# Altium footprint library FootPrintLib_9.PcbLib: 287 footprints (part 10 of 18)
Each footprint in its own frame and in the unit in brackets; x right, y up, seen from the top. Pads: shape width x height; smd on the part's side, far side on the other; paste and mask are expansions set on the pad; w line width, h text height; cw(c..) or ccw(c..) is an arc to the next point about the centre after c.
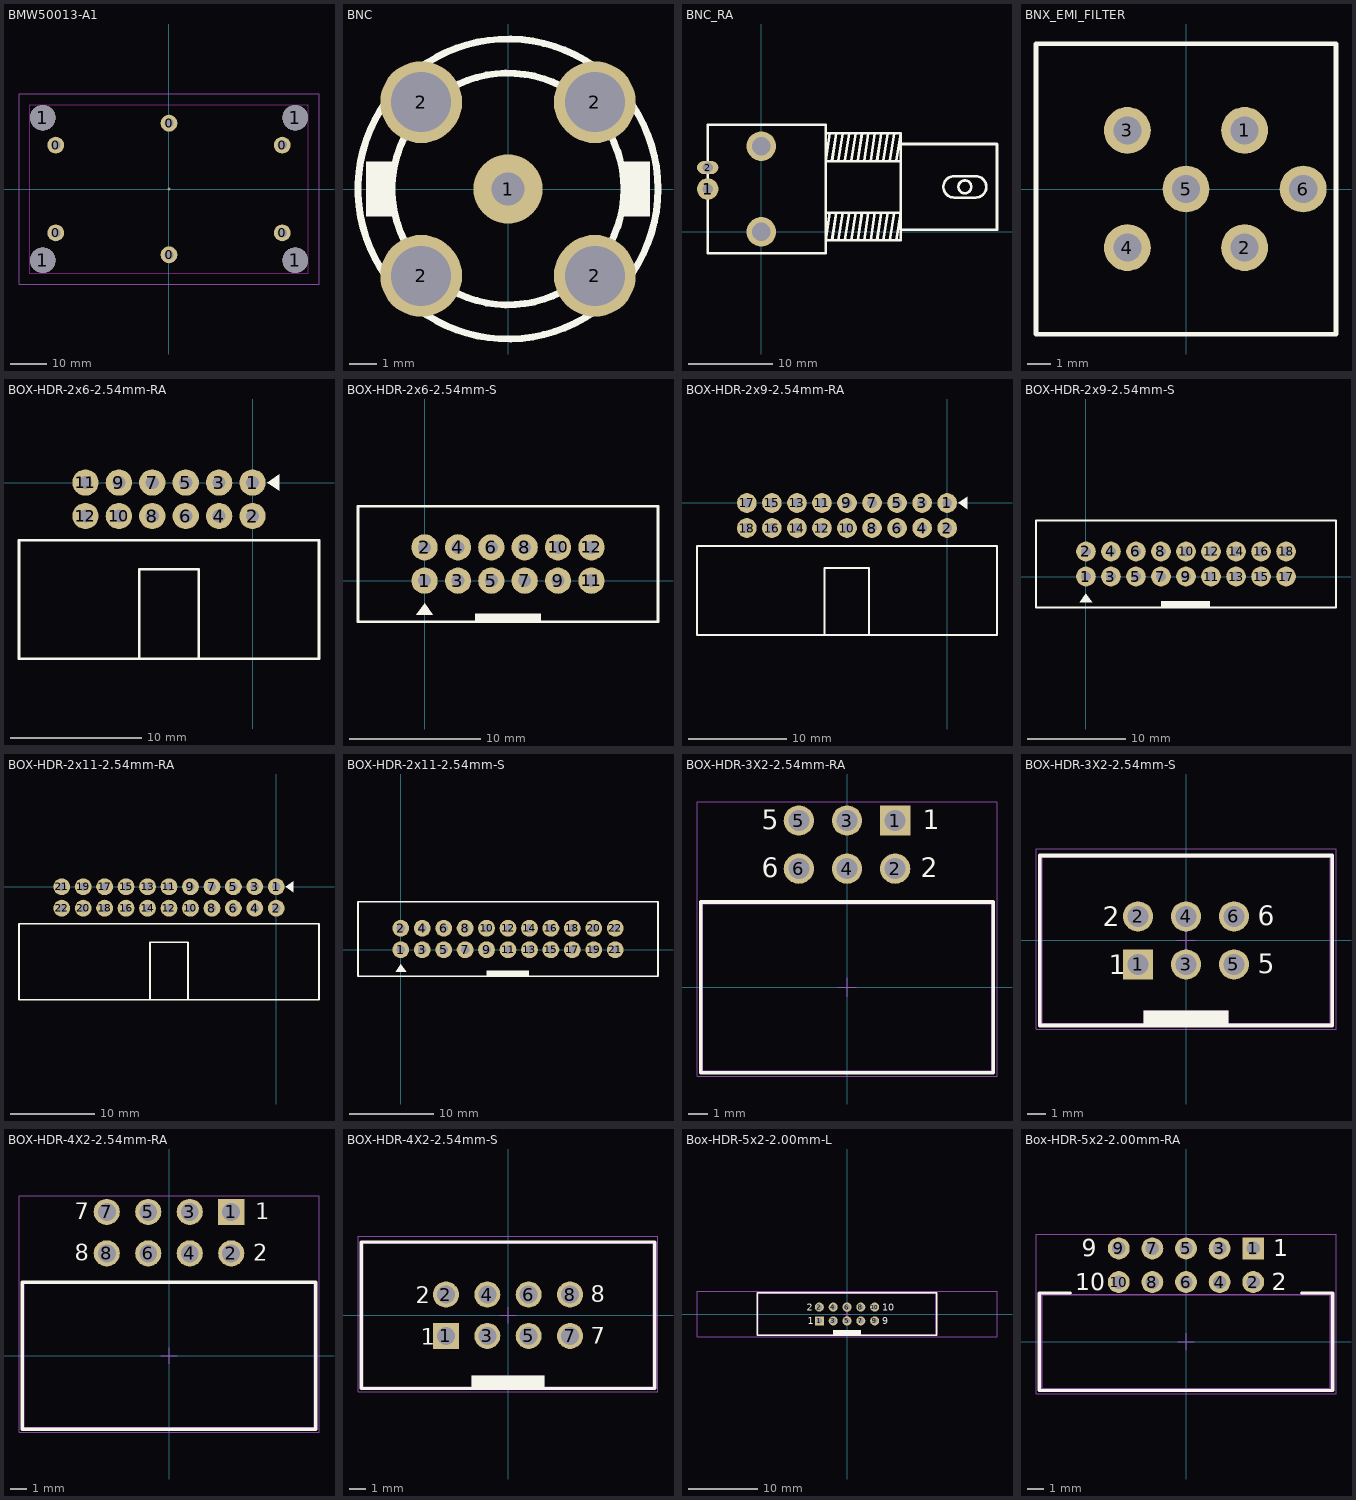
[diagram p9: the footprints below, top view; thin cyan lines are the x and y axes]

## BMW50013-A1 [mm]
pads (10):
  round 4.6 hole 2.5: 0(-30.95,-12) 0(-30.95,12) 0(0,-18) 0(0,18) 0(30.95,-12) 0(30.95,12)
  round 7 hole 7: 1(-34.5,-19.5) 1(-34.5,19.5) 1(34.5,-19.5) 1(34.5,19.5)
via 0,0 diameter 0.8 hole 0.5
Keep-Out Layer:
  lines w0.254: -38.1,-23 -38.1,23 38.1,23 38.1,-23 -38.1,-23
Mechanical 15:
  lines w0.254: -41,-26 41,-26 41,26 -41,26 -41,-26

## BNC [mm]
pads (5):
  round 2.54 hole 1.2: 1(0,0)
  round 3 hole 2.2: 2(-3.182,-3.182) 2(-3.182,3.182) 2(3.182,-3.182) 2(3.182,3.182)
Top Overlay:
  circle w0.254: c0,0 r4.25
  circle w0.254: c0,0 r5.5
  rectangle: -5.207,-1.016 -4.191,1.016
  region: 5.207,1.016 4.191,1.016 4.191,-1.016 5.207,-1.016

## BNC_RA [mm]
pads (4):
  round 2.54 hole 1.2: 1(-6.35,5.08)
  oval 2.54x1.524 hole 1.2: 2(-6.35,7.62)
  round 3.5 hole 2.2: ""(0,0) ""(0,10.16)
Top Overlay:
  circle w0.305: c24.13,5.334 r0.762
  lines w0.305: 7.62,2.286 16.51,2.286 16.002,-1.016 ; 7.62,11.684 16.51,11.684 ; 8.128,2.286 7.62,-1.016 16.51,-1.016 16.51,11.684 ; 8.128,11.684 7.62,8.382 16.51,8.382 ; 8.382,-1.016 8.89,2.286 ; 8.382,8.382 8.89,11.684 ; 9.144,-1.016 9.652,2.286 ; 9.144,8.382 9.652,11.684 ; 9.906,-1.016 10.414,2.286 ; 9.906,8.382 10.414,11.684 ; 10.668,-1.016 11.176,2.286 ; 10.668,8.382 11.176,11.684 ; 11.43,-1.016 11.938,2.286 ; 11.43,8.382 11.938,11.684 ; 12.192,-1.016 12.7,2.286 ; 12.192,8.382 12.7,11.684 ; 12.954,-1.016 13.462,2.286 ; 12.954,8.382 13.462,11.684 ; 13.716,-1.016 14.224,2.286 ; 13.716,8.382 14.224,11.684 ; 14.478,-1.016 14.986,2.286 ; 14.478,8.382 14.986,11.684 ; 15.24,-1.016 15.748,2.286 ; 15.24,8.382 15.748,11.684 ; 16.002,8.382 16.51,11.684 ; 16.51,0.254 27.94,0.254 27.94,10.414 16.51,10.414 ; -6.35,-2.54 -6.35,12.7 7.62,12.7 7.62,-2.54 -6.35,-2.54 ; 22.86,4.064 cw(c22.86,5.334) 22.86,6.604 25.4,6.604 cw(c25.4,5.334) 25.4,4.064 22.86,4.064

## BNX_EMI_FILTER [mm] "Murata Co."
pads (6):
  round 2 hole 1.2 mask+0.1: 1(2.5,2.5) 2(2.5,-2.5) 3(-2.5,2.5) 4(-2.5,-2.5) 5(0,0) 6(5,0)
Top Overlay:
  lines w0.2: -6.4,-6.2 -6.4,6.2 6.4,6.2 6.4,-6.2 -6.4,-6.2
3D body "User Library-Murata_BNX002.STEP": height 12.5, standoff -5, extent -6,-5.5 6,5.5

## BOX-HDR-2x6-2.54mm-RA [mm] "Male Box Header Connector 2X6 Pitch 2.54mm"
height 8.8
pads (12):
  round 2 hole 1: 1(0,0) 2(0,-2.54) 3(-2.54,0) 4(-2.54,-2.54) 5(-5.08,0) 6(-5.08,-2.54) 7(-7.62,0) 8(-7.62,-2.54) 9(-10.16,0) 10(-10.16,-2.54) 11(-12.7,0) 12(-12.7,-2.54)
Top Overlay:
  region: 1.133,0 2.025,0.637 2.025,-0.637
  lines w0.2: -8.6,-13.375 -8.6,-6.575 -4.1,-6.575 -4.1,-13.375 ; -17.75,-13.375 -17.75,-4.375 5.05,-4.375 5.05,-13.375 -17.75,-13.375
3D body "IDC2x6_254_RA.step": height 9, standoff -2, extent -17.75,-13.38 5.05,0.4

## BOX-HDR-2x6-2.54mm-S [mm] "Male Box Header Connector 2X6 Pitch 2.54mm"
height 9
pads (12):
  round 2 hole 1: 1(0,0) 2(0,2.54) 3(2.54,0) 4(2.54,2.54) 5(5.08,0) 6(5.08,2.54) 7(7.62,0) 8(7.62,2.54) 9(10.16,0) 10(10.16,2.54) 11(12.7,0) 12(12.7,2.54)
Top Overlay:
  rectangle: 3.85,-3.13 8.85,-2.48
  region: 0,-1.88
  region: 0,-1.73 0.625,-2.605 -0.625,-2.605
  lines w0.2: -5.07,-3.13 -5.07,5.67 17.77,5.67 17.77,-3.13 -5.07,-3.13
3D body "IDC2x6_254_V.step": height 9, standoff -2, extent -5.05,-3.13 17.75,5.67

## BOX-HDR-2x9-2.54mm-RA [mm] "Male Box Header Connector 2X9 Pitch 2.54mm"
height 8.8
pads (18):
  round 2 hole 1: 1(0,0) 2(0,-2.54) 3(-2.54,0) 4(-2.54,-2.54) 5(-5.08,0) 6(-5.08,-2.54) 7(-7.62,0) 8(-7.62,-2.54) 9(-10.16,0) 10(-10.16,-2.54) 11(-12.7,0) 12(-12.7,-2.54) 13(-15.24,0) 14(-15.24,-2.54) 15(-17.78,0) 16(-17.78,-2.54) 17(-20.32,0) 18(-20.32,-2.54)
Top Overlay:
  region: 1.133,0 2.025,0.637 2.025,-0.637
  lines w0.2: -12.42,-13.375 -12.42,-6.575 -7.92,-6.575 -7.92,-13.375 ; -25.37,-13.375 -25.37,-4.375 5.05,-4.375 5.05,-13.375 -25.37,-13.375
3D body "IDC2x9_254_RA.step": height 9, standoff -2, extent -25.37,-13.38 5.05,0.4

## BOX-HDR-2x9-2.54mm-S [mm] "Male Box Header Connector 2X9 Pitch 2.54mm"
height 9
pads (18):
  round 2 hole 1: 1(0,0) 2(0,2.54) 3(2.54,0) 4(2.54,2.54) 5(5.08,0) 6(5.08,2.54) 7(7.62,0) 8(7.62,2.54) 9(10.16,0) 10(10.16,2.54) 11(12.7,0) 12(12.7,2.54) 13(15.24,0) 14(15.24,2.54) 15(17.78,0) 16(17.78,2.54) 17(20.32,0) 18(20.32,2.54)
Top Overlay:
  rectangle: 7.62,-3.13 12.62,-2.48
  region: 0,-1.88
  region: 0,-1.73 0.625,-2.605 -0.625,-2.605
  lines w0.2: -5.07,-3.13 -5.07,5.67 25.39,5.67 25.39,-3.13 -5.07,-3.13
3D body "IDC2x9_254_V.step": height 9, standoff -2, extent -5.05,-3.13 25.37,5.67

## BOX-HDR-2x11-2.54mm-RA [mm] "Male Box Header Connector 2X11 Pitch 2.54mm"
height 8.8
pads (22):
  round 2 hole 1: 1(0,0) 2(0,-2.54) 3(-2.54,0) 4(-2.54,-2.54) 5(-5.08,0) 6(-5.08,-2.54) 7(-7.62,0) 8(-7.62,-2.54) 9(-10.16,0) 10(-10.16,-2.54) 11(-12.7,0) 12(-12.7,-2.54) 13(-15.24,0) 14(-15.24,-2.54) 15(-17.78,0) 16(-17.78,-2.54) 17(-20.32,0) 18(-20.32,-2.54) 19(-22.86,0) 20(-22.86,-2.54) 21(-25.4,0) 22(-25.4,-2.54)
Top Overlay:
  region: 1.133,0 2.025,0.637 2.025,-0.637
  lines w0.2: -14.945,-13.375 -14.945,-6.575 -10.445,-6.575 -10.445,-13.375 ; -30.45,-13.375 -30.45,-4.375 5.05,-4.375 5.05,-13.375 -30.45,-13.375
3D body "IDC2x11_254_RA.step": height 9, standoff -2, extent -30.45,-13.38 5.05,0.4

## BOX-HDR-2x11-2.54mm-S [mm] "Male Box Header Connector 2X11 Pitch 2.54mm"
height 9
pads (22):
  round 2 hole 1: 1(0,0) 2(0,2.54) 3(2.54,0) 4(2.54,2.54) 5(5.08,0) 6(5.08,2.54) 7(7.62,0) 8(7.62,2.54) 9(10.16,0) 10(10.16,2.54) 11(12.7,0) 12(12.7,2.54) 13(15.24,0) 14(15.24,2.54) 15(17.78,0) 16(17.78,2.54) 17(20.32,0) 18(20.32,2.54) 19(22.86,0) 20(22.86,2.54) 21(25.4,0) 22(25.4,2.54)
Top Overlay:
  rectangle: 10.17,-3.13 15.17,-2.48
  region: 0,-1.88
  region: 0,-1.73 0.625,-2.605 -0.625,-2.605
  lines w0.2: -5.07,-3.13 -5.07,5.67 30.47,5.67 30.47,-3.13 -5.07,-3.13
3D body "IDC2x11_254_V.step": height 9, standoff -2, extent -5.05,-3.13 30.45,5.67

## BOX-HDR-3X2-2.54mm-RA [mm] "6 pins, right angled, gold plating"
height 9.1
pads (6):
  rect 1.6x1.6 hole 1.1: 1(2.54,8.805)
  round 1.6 hole 1.1: 2(2.54,6.265) 3(0,8.805) 4(0,6.265) 5(-2.54,8.805) 6(-2.54,6.265)
Top Overlay:
  lines w0.2: -7.715,-4.5 -7.715,4.5 7.715,4.5 7.715,-4.5 -7.715,-4.5
  text "5" at -4.5,8.34 h1.02
  text "2" at 3.9,5.8 h1.02
  text "1" at 4,8.34 h1.02
  text "6" at -4.5,5.8 h1.02
Mechanical 13:
  lines w0.1: -7.64,-4.425 -7.64,4.425 7.64,4.425 7.64,-4.425 -7.64,-4.425
Mechanical 15:
  lines w0.05: -0.5,0 0.5,0 ; 0,-0.5 0,0.5 ; -7.915,-4.7 7.915,-4.7 7.915,9.805 -7.915,9.805 -7.915,-4.7
3D body "61200621721.stp": height 9.23, standoff -2.88, extent -7.64,-4.425 7.64,9.125

## BOX-HDR-3X2-2.54mm-S [mm] "6 pins, straight, gold plating"
height 9.1
pads (6):
  rect 1.6x1.6 hole 1.1: 1(-2.54,-1.27)
  round 1.6 hole 1.1: 2(-2.54,1.27) 3(0,-1.27) 4(0,1.27) 5(2.54,-1.27) 6(2.54,1.27)
Top Overlay:
  rectangle: -2.25,-4.5 2.25,-3.7
  lines w0.2: -7.74,-4.5 7.74,-4.5 7.74,4.5 -7.74,4.5 -7.74,-4.5
  text "1" at -4.1,-1.8 h1.02
  text "6" at 3.8,0.8 h1.02
  text "2" at -4.4,0.74 h1.02
  text "5" at 3.8,-1.74 h1.02
Mechanical 13:
  rectangle: -2.25,-4.425 2.25,-3.7
  lines w0.1: -7.64,-4.425 -7.64,4.425 7.64,4.425 7.64,-4.425 -7.64,-4.425
Mechanical 15:
  lines w0.05: -0.5,0 0.5,0 ; 0,-0.5 0,0.5 ; -7.94,-4.7 7.94,-4.7 7.94,4.85 -7.94,4.85 -7.94,-4.7
3D body "61200621621.stp": height 9.13, standoff -2.98, extent -7.64,-4.425 7.64,4.75

## BOX-HDR-4X2-2.54mm-RA [mm] "8 pins, right angled, gold plating"
height 9.1
pads (8):
  rect 1.6x1.6 hole 1.1: 1(3.81,8.805)
  round 1.6 hole 1.1: 2(3.81,6.265) 3(1.27,8.805) 4(1.27,6.265) 5(-1.27,8.805) 6(-1.27,6.265) 7(-3.81,8.805) 8(-3.81,6.265)
Top Overlay:
  lines w0.2: -8.985,-4.5 -8.985,4.5 8.985,4.5 8.985,-4.5 -8.985,-4.5
  text "8" at -5.77,5.8 h1.02
  text "7" at -5.77,8.34 h1.02
  text "2" at 5.17,5.8 h1.02
  text "1" at 5.27,8.34 h1.02
Mechanical 13:
  lines w0.1: -8.91,-4.425 -8.91,4.425 8.91,4.425 8.91,-4.425 -8.91,-4.425
Mechanical 15:
  lines w0.05: -0.5,0 0.5,0 ; 0,-0.5 0,0.5 ; -9.185,-4.7 9.185,-4.7 9.185,9.805 -9.185,9.805 -9.185,-4.7
3D body "61200821721.stp": height 9.23, standoff -2.88, extent -8.91,-4.425 8.91,9.125

## BOX-HDR-4X2-2.54mm-S [mm] "8 pins, straight, gold plating"
height 9.1
pads (8):
  rect 1.6x1.6 hole 1.1: 1(-3.81,-1.27)
  round 1.6 hole 1.1: 2(-3.81,1.27) 3(-1.27,-1.27) 4(-1.27,1.27) 5(1.27,-1.27) 6(1.27,1.27) 7(3.81,-1.27) 8(3.81,1.27)
Top Overlay:
  rectangle: -2.25,-4.5 2.25,-3.7
  lines w0.2: -9.01,-4.5 -9.01,4.5 9.01,4.5 9.01,-4.5 -9.01,-4.5
  text "8" at 5.07,0.8 h1.02
  text "7" at 5.07,-1.74 h1.02
  text "2" at -5.67,0.74 h1.02
  text "1" at -5.37,-1.8 h1.02
Mechanical 13:
  rectangle: -2.25,-4.425 2.25,-3.7
  lines w0.1: -8.91,-4.425 8.91,-4.425 8.91,4.425 -8.91,4.425 -8.91,-4.425
Mechanical 15:
  lines w0.05: -0.5,0 0.5,0 ; 0,-0.5 0,0.5 ; -9.21,-4.7 -9.21,4.85 9.21,4.85 9.21,-4.7 -9.21,-4.7
3D body "61200821621.stp": height 9.13, standoff -2.98, extent -8.91,-4.425 8.91,4.75

## Box-HDR-5x2-2.00mm-L [mm] "2.00mm Male Box Header with Lever, 10p"
height 16.85
pads (10):
  rect 1.3x1.3 hole 0.8: 1(-4,-1)
  round 1.3 hole 0.8: 2(-4,1) 3(-2,-1) 4(-2,1) 5(0,-1) 6(0,1) 7(2,-1) 8(2,1) 9(4,-1) 10(4,1)
Top Overlay:
  rectangle: -2,-3.1 2,-2.3
  lines w0.2: -13,-3.1 -13,3.1 13,3.1 13,-3.1 -13,-3.1
  text "9" at 5.1,-1.5 h1.02
  text "1" at -5.7,-1.5 h1.02
  text "10" at 5.1,0.5 h1.02
  text "2" at -5.8,0.5 h1.02
Mechanical 13:
  rectangle: -2,-3 2,-2.3
  lines w0.1: -12.85,-3 -12.85,3 12.85,3 12.85,-3 -12.85,-3
Mechanical 15:
  lines w0.05: -0.5,0 0.5,0 ; 0,-0.5 0,0.5 ; -21.7,-3.3 21.7,-3.3 21.7,3.3 -21.7,3.3 -21.7,-3.3
3D body "62501022021.stp": height 16.9, standoff -2.95, extent -14.062,-3 14.063,3

## Box-HDR-5x2-2.00mm-RA [mm] "2.00mm Male Angled Box Header, 10p"
height 5.4
pads (10):
  rect 1.3x1.3 hole 0.8: 1(4,5.55)
  round 1.3 hole 0.8: 2(4,3.55) 3(2,5.55) 4(2,3.55) 5(0,5.55) 6(0,3.55) 7(-2,5.55) 8(-2,3.55) 9(-4,5.55) 10(-4,3.55)
Top Overlay:
  lines w0.2: -6.875,2.9 -8.725,2.9 -8.725,-2.9 8.725,-2.9 8.725,2.9 6.875,2.9
  text "2" at 5.1,3.075 h1.02
  text "10" at -6.6,3.075 h1.02
  text "1" at 5.2,5.075 h1.02
  text "9" at -6.2,5.075 h1.02
Mechanical 13:
  lines w0.1: -8.6,-2.8 8.6,-2.8 8.6,2.8 -8.6,2.8 -8.6,-2.8
Mechanical 15:
  lines w0.05: -0.5,0 0.5,0 ; 0,-0.5 0,0.5 ; -8.925,-3.1 8.925,-3.1 8.925,6.4 -8.925,6.4 -8.925,-3.1
3D body "62501021721.stp": height 5.5, standoff -2.83, extent -8.6,-2.8 8.6,5.85